# EAGLE library part 6130XX11021_61300911021 (library WR-PHD)
WR-PHD 2.54 mm THT Angled Pin Header Article Properties Pins 2 unitless; 3 unitless; 4 unitless; 5 unitless; 6 unitless; 7 unitless; 8 unitless; 9 unitless; 10 unitless; 12 unitless; 14 unitless; 15 unitless; 16 unitless; 18 unitless; 22 unitless; 32 unitless; 34 unitless; 36 unitless; 40 unitless General Information Operating Temperature -40 °C up to +105 °C Pitch 2.54 mm Durability 25 Mating cycles Rows Single Gender Pin Header Type Angled Material Properties Insulator Material PA6T Insulator Flammability Rating UL94 V-0 Contact Material Copper Alloy Contact Plating Gold Contact Type Stamped Certification UL Approval E323964 Packaging Properties Packaging Bag Electrical Properties ithstanding Voltage 500 V (AC) Contact Resistance 20 mΩ RISO 1000 MΩ <https://www.we-online.com/components/media/o33210v209%20Family_WR-PHD_6130xx11021.jpg> Details see: www.we-online.com/en/components/products/PHD_2_54_THT_ANGLED_PIN_HEADER_6130XX11021 <www.we-online.com/catalog/PHD_2_54_THT_ANGLED_PIN_HEADER_6130XX11021/?utm_source=eagle_model&utm_medium=description_link&utm_campaign=eisos_eagle> Updated by Ella 2021-12-08 2021 (C) Würth Elektronik
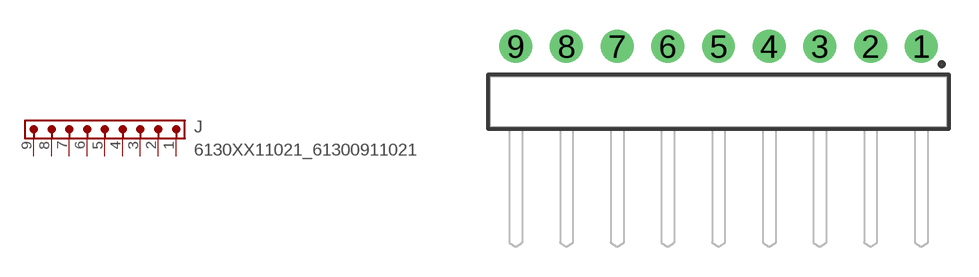
[diagram p149: symbol with the pads of 61300911021; footprint 61300911021]

Designator prefix J

## 6130XX11021_61300911021 (DATASHEET-URL: https://www.we-online.com/redexpert/spec/61300911021?ae; GENDER: Pin Header; IR: 3A; MOUNT: THT; PACKAGING: Bag; PART-NUMBER: 61300911021; PINS: 9; PITCH: 2.54 mm; ROWS: Single; TYPE: Angled; VALUE: 61300911021)  [61300911021]
1  1  pas
2  2  pas
3  3  pas
4  4  pas
5  5  pas
6  6  pas
7  7  pas
8  8  pas
9  9  pas

## Footprint 61300911021 (pad centres in mm)
WR-PHD 2.54mm Angled Pin Header, 9 Pins
drill 1.1: 1 10.16,2.77; 2 7.62,2.77; 3 5.08,2.77; 4 2.54,2.77; 5 0,2.77; 6 -2.54,2.77; 7 -5.08,2.77; 8 -7.62,2.77; 9 -10.16,2.77